# Altium footprint library ReguladoresTransistores.PcbLib: 20 footprints (part 1 of 2)
Each footprint in its own frame and in the unit in brackets; x right, y up, seen from the top. Pads: shape width x height; smd on the part's side, far side on the other; paste and mask are expansions set on the pad; w line width, h text height; cw(c..) or ccw(c..) is an arc to the next point about the centre after c.
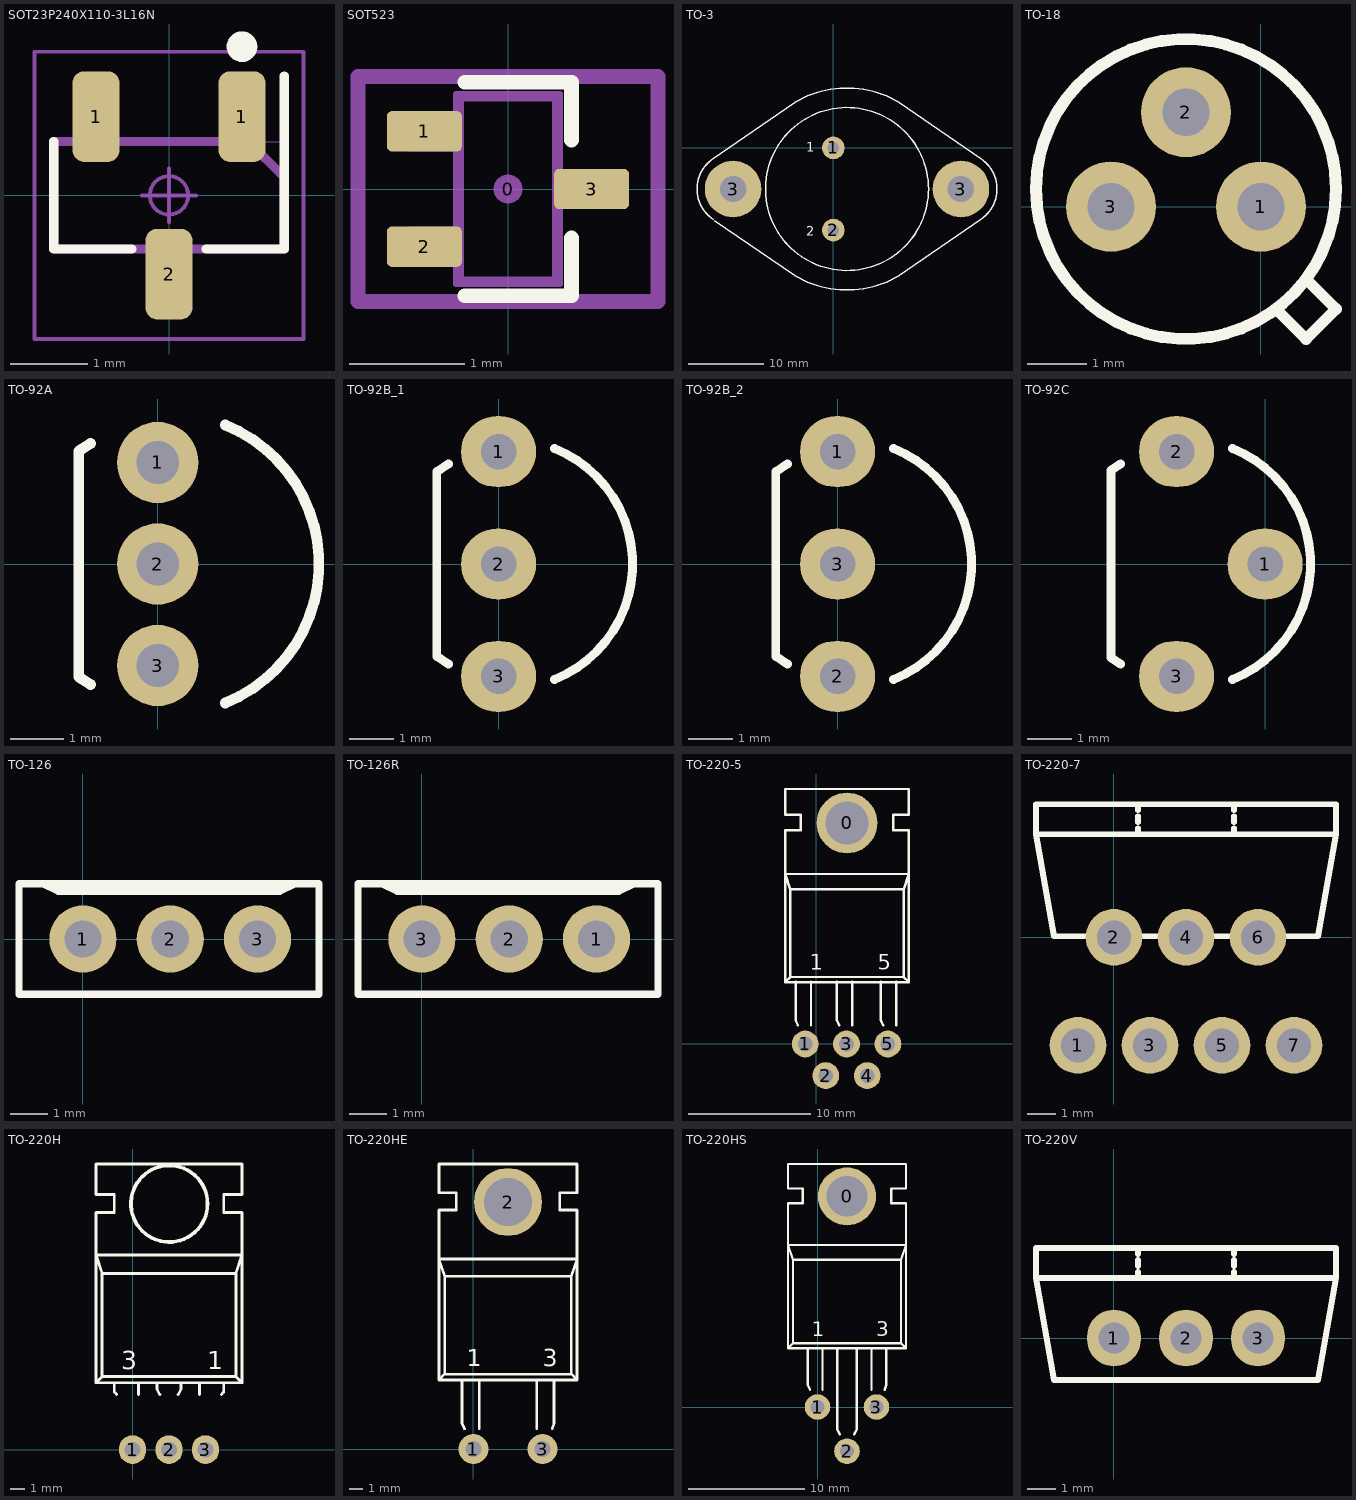
[diagram p0: the footprints below, top view; thin cyan lines are the x and y axes]

## SOT23P240X110-3L16N [mm] "Small Outline Transistor (SOT23), 0.95 mm pitch;3 pin,2.90 mm L X 1.30 mm W X 1.10 mm H body"
height 1.1
pads (3):
  rrect49% 0.61x1.18 smd: 1(-0.95,1.025) 1(0.95,1.025) 2(0,-1.025)
Top Overlay:
  circle w0.2: c0.95,1.935 r0.1
  lines w0.12: -1.5,0.7 -1.5,-0.7 -0.485,-0.7 ; 0.485,-0.7 1.5,-0.7 1.5,1.555
Mechanical 13:
  lines w0.001: -1.5,-0.7 -1.5,0.7 1.5,0.7 1.5,-0.7 -1.5,-0.7
  lines w0.12: -1.5,-0.7 -1.5,0.7 1.033,0.7 1.5,0.233 1.5,-0.7 -1.5,-0.7
Mechanical 15:
  circle w0.05: c0,0 r0.25
  lines w0.05: -0.35,0 0.35,0 ; 0,-0.35 0,0.35 ; -1.75,-1.87 -1.75,1.87 1.75,1.87 1.75,-1.87 -1.75,-1.87
3D body "SOT95P240X110-3L16N.STEP": height 1.1, standoff 0, extent -1.45,-1.2 1.45,1.2

## SOT523 [mm] "3 Lead SC75; EIAJ-SC75; SOT523; SOT416?"
height 0.9
pads (4):
  round 0.254 on Mech15: 0(0,0)
  rrect25% 0.65x0.35 smd: 1(-0.725,0.5) 2(-0.725,-0.5) 3(0.725,0)
Top Overlay:
  lines w0.127: -0.375,-0.925 0.55,-0.925 0.55,-0.425 ; -0.375,0.925 0.55,0.925 0.55,0.425
  text "." at -1.455,0.5 h0.05
Mechanical 13:
  lines w0.05: -0.669,-0.65 -0.669,-0.35 ; -0.669,0.35 -0.669,0.65 ; -0.623,-0.65 -0.623,-0.35 ; -0.623,0.35 -0.623,0.65 ; -0.61,-0.65 -0.61,-0.35 ; -0.61,0.35 -0.61,0.65 ; 0.61,-0.15 0.61,0.15 ; 0.623,-0.15 0.623,0.15 ; 0.669,-0.15 0.669,0.15 ; -0.45,-0.825 0.45,-0.825 ; -0.45,-0.825 -0.45,0.825 ; -0.45,-0.825 -0.408,-0.783 ; -0.45,0.825 0.45,0.825 ; -0.45,0.825 -0.408,0.783 ; -0.408,-0.783 0.408,-0.783 ; -0.408,-0.783 -0.408,0.783 ; -0.408,0.783 0.408,0.783 ; 0.408,-0.783 0.45,-0.825 ; 0.408,-0.783 0.408,0.783 ; 0.408,0.783 0.45,0.825 ; 0.45,-0.825 0.45,0.825 ; -0.85,-0.65 -0.85,-0.35 -0.429,-0.35 -0.429,-0.65 -0.85,-0.65 ; -0.85,0.35 -0.85,0.65 -0.429,0.65 -0.429,0.35 -0.85,0.35 ; 0.429,-0.15 0.85,-0.15 0.85,0.15 0.429,0.15 0.429,-0.15
Mechanical 15:
  lines w0.127: -1.3,-0.975 1.3,-0.975 1.3,0.975 -1.3,0.975 -1.3,-0.975
3D body "SOT523.STEP": height 0.9, standoff 0, extent -0.85,-0.825 0.85,0.825

## TO-3 [mm]
pads (4):
  round 3 hole 1.5: 1(0,0) 2(0,-10.922)
  round 7.5 hole 3.5: 3(-13.297,-5.461) 3(16.929,-5.461)
Top Overlay:
  circle w0.2: c1.816,-5.461 r10.813
  lines w0.2: -15.964,-1.439 -5.169,5.969 ; -15.935,-9.497 cw(c-13.212,-5.461) -15.935,-1.425 ; -15.752,-9.694 -5.169,-16.891 ; -5.085,-16.946 ccw(c1.816,-5.461) 8.717,-16.946 ; -5.085,6.024 cw(c1.816,-5.461) 8.717,6.024 ; 8.801,-16.891 19.596,-9.483 ; 8.801,5.969 19.596,-1.439 ; 19.567,-9.497 ccw(c16.844,-5.461) 19.567,-1.425
  text "1" at -3.556,-0.508 h1.27
  text "2" at -3.556,-11.684 h1.27

## TO-18 [mil]
pads (3):
  round 60 hole 31.5: 1(0,0) 2(-50,62.99) 3(-100,0)
Top Overlay:
  circle w7.87: c-50,11.81 r100
  lines w7.87: 10,-68.19 30,-88.19 50,-68.19 30,-48.19

## TO-92A [mil]
pads (3):
  round 60 hole 31.5: 1(0,75) 2(0,0) 3(0,-75)
Top Overlay:
  lines w7.87: -49.71,-89.08 -58.33,-83.33 -58.33,83.33 -49.71,89.08 ; 49.85,-102.76 ccw(c8.33,0) 49.85,102.76

## TO-92B_1 [mm] "2N3904-2N3906-7805"
pads (3):
  oval 1.7x1.6 hole 0.8: 1(0,2.54) 2(0,0) 3(0,-2.54)
Top Overlay:
  lines w0.2: -1.136,-2.263 -1.397,-2.088 -1.397,2.088 -1.136,2.263 ; 1.266,-2.61 ccw(c0.212,0) 1.266,2.61
3D body "to-92-100.step": height 8.4, standoff -5.5, extent -1.35,-2.78 2.599,2.78

## TO-92B_2 [mm] "LM317"
pads (3):
  oval 1.7x1.6 hole 0.8: 1(0,2.54) 2(0,-2.54) 3(0,0)
Top Overlay:
  lines w0.2: -1.136,-2.263 -1.397,-2.088 -1.397,2.088 -1.136,2.263 ; 1.266,-2.61 ccw(c0.212,0) 1.266,2.61
3D body "to-92-100.step": height 8.4, standoff -5.5, extent -1.35,-2.78 2.599,2.78

## TO-92C [mm]
pads (3):
  oval 1.7x1.6 hole 0.8: 1(0,0) 2(-2,2.54) 3(-2,-2.54)
Top Overlay:
  lines w0.2: -3.263,-2.263 -3.482,-2.117 -3.482,2.117 -3.263,2.263 ; -0.734,-2.61 ccw(c-1.788,0) -0.734,2.61

## TO-126 [mm]
pads (3):
  round 1.8 hole 1: 1(0,0) 2(2.34,0) 3(4.68,0)
Top Overlay:
  lines w0.2: -1.079,1.482 -0.656,1.282 5.27,1.282 5.694,1.482 ; -1.714,-1.482 6.329,-1.482 6.329,1.482 -1.714,1.482 -1.714,-1.482

## TO-126R [mm]
pads (3):
  round 1.8 hole 1: 1(4.68,0) 2(2.34,0) 3(0,0)
Top Overlay:
  lines w0.2: -1.079,1.482 -0.656,1.282 5.27,1.282 5.694,1.482 ; -1.714,-1.482 6.329,-1.482 6.329,1.482 -1.714,1.482 -1.714,-1.482

## TO-220-5 [mm]
pads (6):
  round 5 hole 3.5: 0(2.54,18.161)
  round 2.2 hole 1.2: 1(-0.9,0) 2(0.8,-2.6) 3(2.5,0) 4(4.2,-2.6) 5(5.9,0)
Top Overlay:
  lines w0.2: -1.687,5.119 -1.687,1.944 -1.495,1.539 ; -0.417,1.539 -0.417,5.119 ; 1.713,5.119 1.713,1.944 1.905,1.539 ; 2.983,1.539 2.983,5.119 ; 5.313,5.119 5.313,1.944 5.505,1.539 ; 6.583,1.539 6.583,5.119 ; -2.54,5.08 -2.54,17.568 -1.27,17.568 -1.27,18.838 -2.54,18.838 -2.54,20.955 7.62,20.955 7.62,18.838 6.35,18.838 6.35,17.568 7.62,17.568 7.62,15.028 7.62,5.08 ; -2.54,5.08 7.62,5.08 ; -2.54,5.08 -2.117,5.503 ; -2.117,5.503 -2.117,12.7 ; -2.117,5.503 7.197,5.503 ; -2.117,12.7 -2.54,13.97 7.62,13.97 7.197,12.7 ; -2.117,12.7 7.197,12.7 ; 7.197,5.503 7.62,5.08 ; 7.197,5.503 7.197,12.7
  text "5" at 5.08,6.096 h1.27
  text "1" at -0.508,6.096 h1.27

## TO-220-7 [mm]
pads (7):
  round 2 hole 1.2: 1(-1.27,-3.81) 2(0,0) 3(1.27,-3.81) 4(2.54,0) 5(3.81,-3.81) 6(5.08,0) 7(6.35,-3.81)
Top Overlay:
  lines w0.2: 0.847,3.632 0.847,3.843 ; 0.847,4.055 0.847,4.267 ; 0.847,4.478 0.847,4.69 ; 4.233,3.632 4.233,3.843 ; 4.233,4.055 4.233,4.267 ; 4.233,4.478 4.233,4.69 ; -2.752,3.632 -2.752,4.69 7.832,4.69 7.832,3.632 ; -2.752,3.632 -2.117,0.033 7.197,0.033 7.832,3.632 ; -2.752,3.632 7.832,3.632

## TO-220H [mm]
pads (3):
  oval 1.9x2 hole 1.1: 1(0,0) 2(2.54,0) 3(5.08,0)
Top Overlay:
  circle w0.254: c2.557,17.128 r2.667
  lines w0.2: -1.27,4.025 -1.27,4.66 ; -1.222,3.993 -1.107,3.832 ; 0.423,3.832 0.423,4.66 ; 1.693,4.66 1.693,4.237 1.905,3.832 ; 3.175,3.832 3.387,4.237 3.387,4.66 ; 4.657,3.832 4.657,4.66 ; 6.195,3.832 6.358,4.049 ; 6.35,4.025 6.35,4.66 ; -2.54,4.66 -2.54,16.513 -1.27,16.513 -1.27,17.783 -2.54,17.783 -2.54,19.9 7.62,19.9 7.62,17.783 6.35,17.783 6.35,16.513 7.62,16.513 7.62,4.66 ; -2.54,4.66 7.62,4.66 ; -2.54,4.66 -2.117,5.083 ; -2.117,5.083 -2.117,12.28 ; -2.117,5.083 7.197,5.083 ; -2.117,12.28 -2.54,13.55 7.62,13.55 7.197,12.28 ; -2.117,12.28 7.197,12.28 ; 7.197,5.083 7.197,12.28 ; 7.197,5.083 7.62,4.66
  text "3" at -0.8,5.6 h1.27
  text "1" at 5.2,5.6 h1.27
3D body "to-220h.step": height 4.6, standoff -2.1, extent -2.54,-0.25 7.62,20.45

## TO-220HE [mm]
pads (3):
  round 2.2 hole 1.2: 1(0,0) 3(5.08,0)
  round 5 hole 3.5: 2(2.54,18.161)
Top Overlay:
  lines w0.2: -0.847,5.08 -0.847,1.905 -0.655,1.5 ; 0.423,1.5 0.423,5.08 ; 4.657,1.5 4.657,5.08 ; 5.791,1.5 5.927,1.905 5.927,5.08 ; -2.54,5.08 -2.117,5.503 ; -2.54,5.08 7.62,5.08 ; -2.54,5.08 -2.54,17.568 -1.27,17.568 -1.27,18.838 -2.54,18.838 -2.54,20.955 7.62,20.955 7.62,18.838 6.35,18.838 6.35,17.568 7.62,17.568 7.62,15.028 7.62,5.08 ; -2.117,5.503 7.197,5.503 ; -2.117,5.503 -2.117,12.7 ; -2.117,12.7 7.197,12.7 ; -2.117,12.7 -2.54,13.97 7.62,13.97 7.197,12.7 ; 7.197,5.503 7.197,12.7 ; 7.197,5.503 7.62,5.08
  text "1" at -0.508,6.096 h1.27
  text "3" at 5.08,6.096 h1.27

## TO-220HS [mm]
pads (4):
  round 5 hole 3.5: 0(2.54,18.161)
  round 2.2 hole 1.2: 1(0,0) 2(2.54,-3.81) 3(5.08,0)
Top Overlay:
  lines w0.2: -0.847,5.08 -0.847,1.905 -0.655,1.5 ; 0.423,1.5 0.423,5.08 ; 1.693,5.08 1.693,-1.905 1.917,-2.34 ; 3.163,-2.344 3.387,-1.905 3.387,5.08 ; 4.657,1.5 4.657,5.08 ; 5.791,1.5 5.927,1.905 5.927,5.08 ; -2.54,5.08 -2.54,17.568 -1.27,17.568 -1.27,18.838 -2.54,18.838 -2.54,20.955 7.62,20.955 7.62,18.838 6.35,18.838 6.35,17.568 7.62,17.568 7.62,15.028 7.62,5.08 ; -2.54,5.08 7.62,5.08 ; -2.54,5.08 -2.117,5.503 ; -2.117,5.503 -2.117,12.7 ; -2.117,5.503 7.197,5.503 ; -2.117,12.7 -2.54,13.97 7.62,13.97 7.197,12.7 ; -2.117,12.7 7.197,12.7 ; 7.197,5.503 7.62,5.08 ; 7.197,5.503 7.197,12.7
  text "3" at 5.08,6.096 h1.27
  text "1" at -0.508,6.096 h1.27

## TO-220V [mm]
pads (3):
  oval 1.9x2 hole 1.1: 1(0,0) 2(2.54,0) 3(5.08,0)
Top Overlay:
  lines w0.2: 0.847,2.117 0.847,2.328 ; 0.847,2.54 0.847,2.752 ; 0.847,2.963 0.847,3.175 ; 4.233,2.117 4.233,2.328 ; 4.233,2.54 4.233,2.752 ; 4.233,2.963 4.233,3.175 ; -2.752,2.117 -2.752,3.175 7.832,3.175 7.832,2.117 ; -2.752,2.117 -2.117,-1.482 7.197,-1.482 7.832,2.117 ; -2.752,2.117 7.832,2.117
3D body "to-220.step": height 18.9, standoff -10.5, extent -2.56,-1.8 7.6,2.8